# Altium footprint library Footprint-Lib-PhilsLab.PcbLib: 544 footprints (part 27 of 34)
Each footprint in its own frame and in the unit in brackets; x right, y up, seen from the top. Pads: shape width x height; smd on the part's side, far side on the other; paste and mask are expansions set on the pad; w line width, h text height; cw(c..) or ccw(c..) is an arc to the next point about the centre after c.
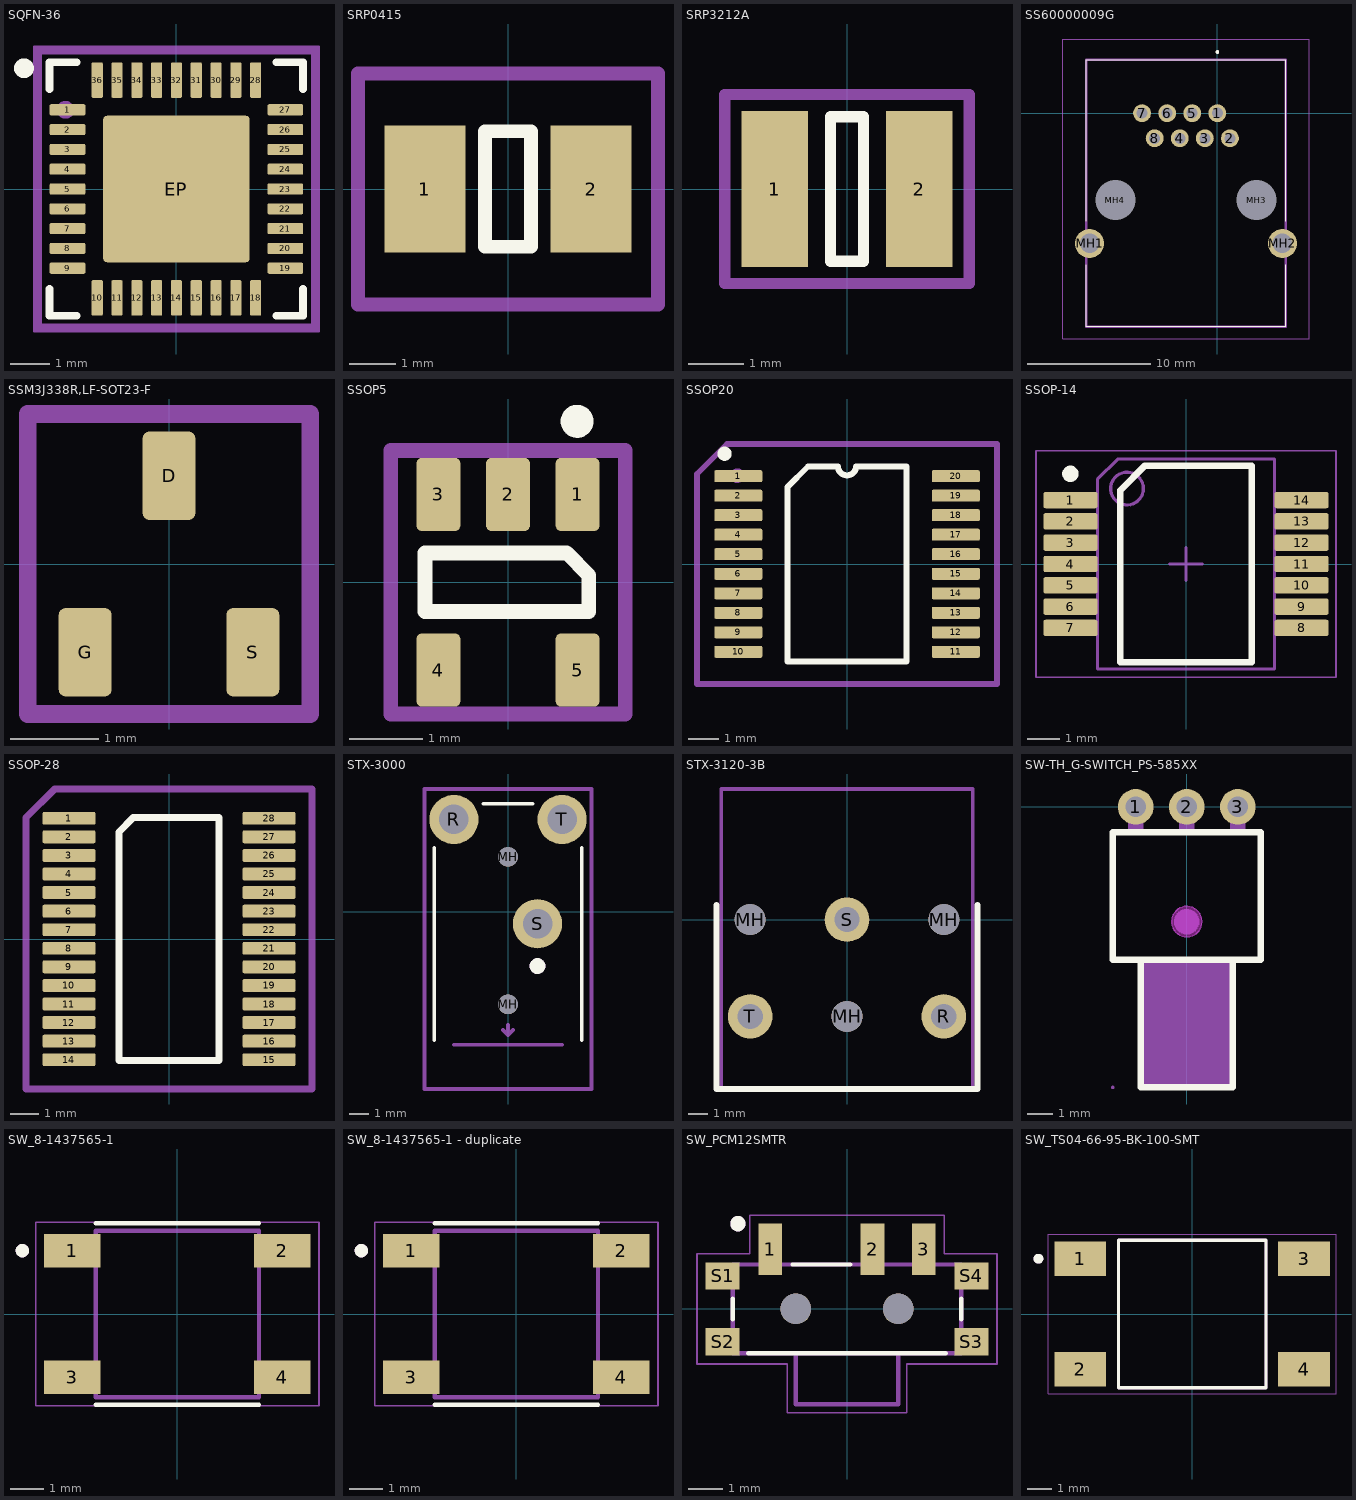
[diagram p26: the footprints below, top view; thin cyan lines are the x and y axes]

## SQFN-36 [mm]
height 1
pads (37):
  rrect25% 0.9x0.28 smd mask+0.05: 1(-2.75,2) 2(-2.75,1.5) 3(-2.75,1) 4(-2.75,0.5) 5(-2.75,0) 6(-2.75,-0.5) 7(-2.75,-1) 8(-2.75,-1.5) 9(-2.75,-2) 19(2.75,-2) 20(2.75,-1.5) 21(2.75,-1) 22(2.75,-0.5) 23(2.75,0) 24(2.75,0.5) 25(2.75,1) 26(2.75,1.5) 27(2.75,2)
  rrect25% 0.28x0.9 smd mask+0.05: 10(-2,-2.75) 11(-1.5,-2.75) 12(-1,-2.75) 13(-0.5,-2.75) 14(0,-2.75) 15(0.5,-2.75) 16(1,-2.75) 17(1.5,-2.75) 18(2,-2.75) 28(2,2.75) 29(1.5,2.75) 30(1,2.75) 31(0.5,2.75) 32(0,2.75) 33(-0.5,2.75) 34(-1,2.75) 35(-1.5,2.75) 36(-2,2.75)
  rrect5% 3.7x3.7 smd: EP(0,0)
Top Overlay:
  circle w0.25: c-3.85,3.05 r0.125
  lines w0.2: -3.2,-2.525 -3.2,-3.2 -2.525,-3.2 ; -3.2,2.525 -3.2,3.2 -2.525,3.2 ; 2.525,-3.2 3.2,-3.2 3.2,-2.525 ; 2.525,3.2 3.2,3.2 3.2,2.525
Mechanical 13:
  circle w0.25: c-2.8,2 r0.1
  lines w0.2: -3.5,-3.5 3.5,-3.5 3.5,3.5 -3.5,3.5 -3.5,-3.5
  text "'.Designator'" at -5.665,-0.417 h1
Mechanical 15:
  lines w0.05: -3.6,-3.6 3.6,-3.6 3.6,3.6 -3.6,3.6 -3.6,-3.6
  lines w0.1: -0.5,0 0.5,0 ; 0,-0.5 0,0.5
3D body "SQFN-36.step": height 1, standoff 0, extent -3.051,-3.051 3.051,3.051

## SRP0415 [mm]
pads (2):
  rect 1.75x2.75 smd: 1(-1.8,0) 2(1.8,0)
Top Overlay:
  lines w0.3: -0.5,-1.25 -0.5,1.25 0.5,1.25 0.5,-1.25 -0.5,-1.25
Mechanical 13:
  lines w0.3: -3.25,-2.5 -3.25,2.5 3.25,2.5 3.25,-2.5 -3.25,-2.5
  text "'.Designator'" at -5.84,-0.925 h1
3D body "SRP0415.stp": height 1.55, standoff 0.05, extent -2.205,-2.05 2.205,2.051

## SRP3212A [mm]
pads (2):
  rect 1.2x2.8 smd: 1(-1.3,0) 2(1.3,0)
Top Overlay:
  lines w0.2: -0.3,-1.3 -0.3,1.3 0.3,1.3 0.3,-1.3 -0.3,-1.3
Mechanical 13:
  lines w0.2: -2.2,-1.7 2.2,-1.7 2.2,1.7 -2.2,1.7 -2.2,-1.7
  text "'.Designator'" at -5.665,-0.417 h1
3D body "SRP3212A.stp": height 1.15, standoff 0.01, extent -1.61,-1.26 1.61,1.26

## SS60000009G [mm]
pads (12):
  round 1.446 hole 0.89: 1(0,0) 2(1.02,-2.03) 3(-1.01,-2.03) 4(-3.04,-2.03) 5(-2.03,0) 6(-4.06,0) 7(-6.09,0) 8(-5.07,-2.03)
  round 2.355 hole 1.57: MH1(-10.335,-10.54) MH2(5.265,-10.54)
  round 1.625 hole 3.25 unplated: MH3(3.18,-7.03) MH4(-8.25,-7.03)
Top Overlay:
  lines w0.1: -10.6,4.32 5.53,4.32 ; -10.6,4.32 5.53,4.32 ; -10.6,4.32 -10.6,-8.75 -10.6,4.32 ; 5.53,-17.25 -10.6,-17.25 5.53,-17.25 ; 5.53,-17.25 5.53,-12.25 5.53,-17.25 ; 5.53,4.32 5.53,-8.75 5.53,4.32 ; -10.6,-17.27 -10.6,-12.25 -10.6,-17.27
  lines w0.2: 0,4.9 cw(c0,4.95) 0,5 ; 0,4.9 ccw(c0,4.95) 0,5 ; 0,4.9 cw(c0,4.95) 0,5
Mechanical 15:
  lines w0.2: -10.6,-17.27 5.53,-17.27 5.53,4.32 -10.6,4.32 -10.6,-17.27
Bottom Assembly:
  lines w0.1: -12.512,-18.27 7.442,-18.27 7.442,6 -12.512,6 -12.512,-18.27
3D body "SS60000-009G.stp": height 13.8, standoff -3.22, extent -10.504,-16.992 5.6,4.192

## SSM3J338R,LF-SOT23-F [mm]
pads (3):
  rrect25% 0.6x1 smd: D(0,1) G(-0.95,-1) S(0.95,-1)
Mechanical 13:
  lines w0.2: -1.6,-1.7 -1.6,1.7 1.6,1.7 1.6,-1.7 -1.6,-1.7
  text "'.Designator'" at -5.84,-0.925 h1
3D body "SOT-23F.STEP": height 0.91, standoff 0, extent -1.45,-1.2 1.45,1.2

## SSOP5 [mm]
pads (5):
  rrect25% 0.6x1 smd: 1(0.95,1.2) 2(0,1.2) 3(-0.95,1.2) 4(-0.95,-1.2) 5(0.95,-1.2)
Top Overlay:
  circle w0.25: c0.944,2.199 r0.1
  lines w0.2: -1.134,-0.4 -1.134,0.4 0.8,0.4 1.104,0.096 1.104,-0.4 -1.134,-0.4
Mechanical 13:
  circle w0.25: c0.962,1.225 r0.1
  lines w0.2: -1.6,-1.8 -1.6,-0.4 -1.6,1.8 1.6,1.8 1.6,-1.8 -1.6,-1.8
  text "'.Designator'" at -5.84,-0.925 h1
3D body "SSOP5.stp": height 1.12, standoff 0, extent -1.45,-1.4 1.45,1.4

## SSOP20 [mm]
pads (20):
  rrect25% 1.6x0.4 smd mask+0.07: 1(-3.625,2.925) 2(-3.625,2.275) 3(-3.625,1.625) 4(-3.625,0.975) 5(-3.625,0.325) 6(-3.625,-0.325) 7(-3.625,-0.975) 8(-3.625,-1.625) 9(-3.625,-2.275) 10(-3.625,-2.925) 11(3.625,-2.925) 12(3.625,-2.275) 13(3.625,-1.625) 14(3.625,-0.975) 15(3.625,-0.325) 16(3.625,0.325) 17(3.625,0.975) 18(3.625,1.625) 19(3.625,2.275) 20(3.625,2.925)
Top Overlay:
  circle w0.25: c-4.079,3.677 r0.112
  lines w0.2: -1.99,-3.25 -1.99,2.56 -1.3,3.25 -0.3,3.25 ccw(c0,3.25) 0.3,3.25 1.99,3.25 1.99,-3.25 -1.99,-3.25
Mechanical 13:
  circle w0.25: c-3.66,2.943 r0.117
  lines w0.2: -5,-4 5,-4 5,4 -4,4 -5,3 -5,-4
  text "'.Designator'" at -5.84,-0.925 h1
3D body "SSOP20.step": height 1.85, standoff 0.01, extent -3.95,-3.63 3.95,3.67

## SSOP-14 [mm]
height 2
pads (14):
  rrect25% 1.65x0.5 smd mask+0.15: 1(-3.525,1.95) 2(-3.525,1.3) 3(-3.525,0.65) 4(-3.525,0) 5(-3.525,-0.65) 6(-3.525,-1.3) 7(-3.525,-1.95) 8(3.525,-1.95) 9(3.525,-1.3) 10(3.525,-0.65) 11(3.525,0) 12(3.525,0.65) 13(3.525,1.3) 14(3.525,1.95)
Top Overlay:
  circle w0.25: c-3.525,2.75 r0.125
  lines w0.2: -2,-3 -2,2.25 -1.25,3 2,3 2,-3 -2,-3
Mechanical 13:
  circle w0.1: c-1.8,2.3 r0.5
  lines w0.1: -2.7,-3.2 -2.7,2.579 -2.079,3.2 2.7,3.2 2.7,-3.2 -2.7,-3.2
  text "'.Designator'" at -6.315,-1.4 h1
Mechanical 15:
  lines w0.05: -4.575,-3.45 4.575,-3.45 4.575,3.45 -4.575,3.45 -4.575,-3.45
  lines w0.1: -0.5,0 0.5,0 ; 0,-0.5 0,0.5
3D body "SSOP-14.step": height 2, standoff 0, extent -3.875,-3.2 3.875,3.2

## SSOP-28 [mm]
pads (28):
  rrect25% 1.85x0.45 smd mask+0.15: 1(-3.5,4.225) 2(-3.5,3.575) 3(-3.5,2.925) 4(-3.5,2.275) 5(-3.5,1.625) 6(-3.5,0.975) 7(-3.5,0.325) 8(-3.5,-0.325) 9(-3.5,-0.975) 10(-3.5,-1.625) 11(-3.5,-2.275) 12(-3.5,-2.925) 13(-3.5,-3.575) 14(-3.5,-4.225) 15(3.5,-4.225) 16(3.5,-3.575) 17(3.5,-2.925) 18(3.5,-2.275) 19(3.5,-1.625) 20(3.5,-0.975) 21(3.5,-0.325) 22(3.5,0.325) 23(3.5,0.975) 24(3.5,1.625) 25(3.5,2.275) 26(3.5,2.925) 27(3.5,3.575) 28(3.5,4.225)
Top Overlay:
  lines w0.25: -1.75,-4.25 1.75,-4.25 1.75,4.25 -1.25,4.25 -1.75,3.75 -1.75,-4.25
Mechanical 13:
  lines w0.25: -5,-5.25 5,-5.25 5,5.25 -4,5.25 -5,4.25 -5,-5.25
  text "'.Designator'" at -5.815,-0.9 h1
3D body "SSOP-28.STEP": height 2.01, standoff 0.01, extent -3.909,-5.108 3.891,5.092

## STX-3000 [mm]
height 5.4
pads (5):
  round 1 hole 1 unplated: MH(0,-4.7) MH(0,2.8)
  round 2.5 hole 1.5: R(-2.75,4.7) S(1.5,-0.6) T(2.75,4.7)
Top Overlay:
  circle w0.5: c1.5,-2.75 r0.15
  lines w0.2: -3.75,-6.5 -3.75,3.25 ; -1.25,5.5 1.25,5.5 ; 3.75,-6.5 3.75,3.25
Mechanical 13:
  circle w0.5: c1.5,-2.75 r0.15
  lines w0.2: -2.75,-6.75 2.75,-6.75 ; -0.25,-6 0,-6.25 ; 0,-5.75 0,-6.25 ; 0.25,-6 0,-6.25 ; -4.25,-9 -4.25,-5 -4.25,6.25 4.25,6.25 4.25,-7.25 4.25,-9 -4.25,-9
  text "'.Designator'" at -5.665,-0.417 h1
3D body "STX-3000.stp": height 5.93, standoff -2.72, extent -3.6,-8.7 3.6,5.266

## STX-3120-3B [mm]
pads (6):
  round 1.6 hole 1.6 unplated: MH(-5,0) MH(0,-5) MH(5,0)
  round 2.3 hole 1.3: R(5,-5) S(0,0) T(-5,-5)
Top Overlay:
  lines w0.3: -6.75,0.75 -6.75,-8.75 6.75,-8.75 6.75,0.75
Mechanical 13:
  lines w0.2: -6.5,-8.75 6.5,-8.75 6.5,6.75 -6.5,6.75 -6.5,-8.75
  text ".Designator" at -4.998,-0.333 h1
3D body "STX-3120-3B.STEP": height 10.22, standoff -3.68, extent -6,-8.6 6,6.5

## SW-TH_G-SWITCH_PS-585XX [mm]
pads (3):
  round 1.4 hole 0.8 paste-2539.97 mask+0.05: 1(-2,0) 2(0,0) 3(2,0)
Top Overlay:
  lines w0.254: -1.8,-6 -1.8,-11 1.8,-11 1.8,-6 ; -2.9,-6 2.9,-6 2.9,-1 -2.9,-1 -2.9,-6
Keep-Out Layer:
  board cut-out: 0.6,-4.5 0.6,-4.534 0.592,-4.601 0.577,-4.666 0.555,-4.73 0.526,-4.791 0.49,-4.848 0.448,-4.901 0.4,-4.948 0.348,-4.99 0.291,-5.026 0.23,-5.055 0.166,-5.078 0.101,-5.093 0.034,-5.1 -0.034,-5.1 -0.101,-5.093 -0.166,-5.078 -0.23,-5.055 -0.291,-5.026 -0.348,-4.99 -0.4,-4.948 -0.448,-4.901 -0.49,-4.848 -0.526,-4.791 -0.555,-4.73 -0.577,-4.666 -0.592,-4.601 -0.6,-4.534 -0.6,-4.5 -0.6,-4.466 -0.592,-4.399 -0.577,-4.334 -0.555,-4.27 -0.526,-4.209 -0.49,-4.152 -0.448,-4.1 -0.4,-4.052 -0.348,-4.01 -0.291,-3.974 -0.23,-3.945 -0.166,-3.923 -0.101,-3.908 -0.034,-3.9 0.034,-3.9 0.101,-3.908 0.166,-3.923 0.23,-3.945 0.291,-3.974 0.348,-4.01 0.4,-4.052 0.448,-4.1 0.49,-4.152 0.526,-4.209 0.555,-4.27 0.577,-4.334 0.592,-4.399 0.6,-4.466 0.6,-4.5
Keep-Out Layer:
  circle w0.003: c0,-4.5 r0.6
  region: 0.6,-4.5 0.6,-4.534 0.592,-4.601 0.577,-4.666 0.555,-4.73 0.526,-4.791 0.49,-4.848 0.448,-4.901 0.4,-4.948 0.348,-4.99 0.291,-5.026 0.23,-5.055 0.166,-5.078 0.101,-5.093 0.034,-5.1 -0.034,-5.1 -0.101,-5.093 -0.166,-5.078 -0.23,-5.055 -0.291,-5.026 -0.348,-4.99 -0.4,-4.948 -0.448,-4.901 -0.49,-4.848 -0.526,-4.791 -0.555,-4.73 -0.577,-4.666 -0.592,-4.601 -0.6,-4.534 -0.6,-4.5 -0.6,-4.466 -0.592,-4.399 -0.577,-4.334 -0.555,-4.27 -0.526,-4.209 -0.49,-4.152 -0.448,-4.1 -0.4,-4.052 -0.348,-4.01 -0.291,-3.974 -0.23,-3.945 -0.166,-3.923 -0.101,-3.908 -0.034,-3.9 0.034,-3.9 0.101,-3.908 0.166,-3.923 0.23,-3.945 0.291,-3.974 0.348,-4.01 0.4,-4.052 0.448,-4.1 0.49,-4.152 0.526,-4.209 0.555,-4.27 0.577,-4.334 0.592,-4.399 0.6,-4.466 0.6,-4.5
  region: 0.6,-4.5 0.591,-4.604 0.564,-4.705 0.52,-4.8 0.46,-4.886 0.386,-4.96 0.3,-5.02 0.205,-5.064 0.104,-5.091 0,-5.1 -0.104,-5.091 -0.205,-5.064 -0.3,-5.02 -0.386,-4.96 -0.46,-4.886 -0.52,-4.8 -0.564,-4.705 -0.591,-4.604 -0.6,-4.5 -0.591,-4.396 -0.564,-4.295 -0.52,-4.2 -0.46,-4.114 -0.386,-4.04 -0.3,-3.981 -0.205,-3.936 -0.104,-3.909 0,-3.9 0.104,-3.909 0.205,-3.936 0.3,-3.981 0.386,-4.04 0.46,-4.114 0.52,-4.2 0.564,-4.295 0.591,-4.396
Mechanical 1:
  circle w0.003: c0,-4.5 r0.6
Top Component Center:
  circle w0.5: c0,-4.5 r0.25
  region: -1.8,-6 -1.8,-11 1.8,-11 1.8,-6
Top Courtyard:
  lines w0.051: -2.9,-6 -2.9,-1 2.9,-1 2.9,-6 1.8,-6 1.8,-11 -1.8,-11 -1.8,-6 -2.9,-6
Mechanical 7:
  region: 2.3,0.15 1.7,0.15 1.7,-1.05 2.3,-1.05
  region: 0.3,0.15 -0.3,0.15 -0.3,-1.05 0.3,-1.05
  region: -1.7,0.15 -2.3,0.15 -2.3,-1.05 -1.7,-1.05
Mechanical 8:
  region: -2.84,-11 -2.84,-11.005 -2.841,-11.014 -2.844,-11.023 -2.849,-11.031 -2.854,-11.039 -2.861,-11.046 -2.868,-11.051 -2.877,-11.056 -2.886,-11.058 -2.895,-11.06 -2.905,-11.06 -2.914,-11.058 -2.923,-11.056 -2.931,-11.051 -2.939,-11.046 -2.946,-11.039 -2.951,-11.031 -2.955,-11.023 -2.958,-11.014 -2.96,-11.005 -2.96,-11 -2.96,-10.995 -2.958,-10.986 -2.955,-10.977 -2.951,-10.969 -2.946,-10.961 -2.939,-10.954 -2.931,-10.949 -2.923,-10.944 -2.914,-10.941 -2.905,-10.94 -2.895,-10.94 -2.886,-10.941 -2.877,-10.944 -2.868,-10.949 -2.861,-10.954 -2.854,-10.961 -2.849,-10.969 -2.844,-10.977 -2.841,-10.986 -2.84,-10.995 -2.84,-11
Mechanical 9:
  region: 1.7,0.15 2.3,0.15 2.3,-0.15 1.7,-0.15
  region: -0.3,0.15 0.3,0.15 0.3,-0.15 -0.3,-0.15
  region: -2.3,0.15 -1.7,0.15 -1.7,-0.15 -2.3,-0.15

## SW_8-1437565-1 [mm]
pads (4):
  rect 1.7x1 smd: 1(-3.15,1.9) 2(3.15,1.9) 3(-3.15,-1.9) 4(3.15,-1.9)
Top Overlay:
  circle w0.2: c-4.65,1.9 r0.1
  lines w0.127: -2.45,-2.72 2.45,-2.72 ; -2.45,2.72 2.45,2.72
Mechanical 13:
  circle w0.2: c-4.65,1.9 r0.1
  lines w0.127: -2.45,-2.5 -2.45,2.5 2.45,2.5 2.45,-2.5 -2.45,-2.5
Mechanical 15:
  lines w0.05: -4.25,-2.75 -4.25,2.75 4.25,2.75 4.25,-2.75 -4.25,-2.75
3D body "8-1437565-1.stp": height 1.5, standoff 0, extent -3.26,-2.44 3.34,2.56

## SW_8-1437565-1 - duplicate [mm]
pads (4):
  rect 1.7x1 smd: 1(-3.15,1.9) 2(3.15,1.9) 3(-3.15,-1.9) 4(3.15,-1.9)
Top Overlay:
  circle w0.2: c-4.65,1.9 r0.1
  lines w0.127: -2.45,-2.72 2.45,-2.72 ; -2.45,2.72 2.45,2.72
Mechanical 13:
  circle w0.2: c-4.65,1.9 r0.1
  lines w0.127: -2.45,-2.5 -2.45,2.5 2.45,2.5 2.45,-2.5 -2.45,-2.5
Mechanical 15:
  lines w0.05: -4.25,-2.75 -4.25,2.75 4.25,2.75 4.25,-2.75 -4.25,-2.75
3D body "8-1437565-1.stp": height 1.65, standoff 0.15, extent -3.3,-2.373 3.3,2.627

## SW_PCM12SMTR [mm]
pads (9):
  rect 0.7x1.5 smd: 1(-2.25,1.75) 2(0.75,1.75) 3(2.25,1.75)
  rect 1x0.8 smd: S1(-3.65,0.965) S2(-3.65,-0.965) S3(3.65,-0.965) S4(3.65,0.965)
  round 0.9 hole 0.9 unplated: ""(-1.5,0) ""(1.5,0)
Top Overlay:
  circle w0.25: c-3.2,2.5 r0.1
  lines w0.127: -3.35,-0.3 -3.35,0.3 ; -2.9,-1.3 2.9,-1.3 ; -1.6,1.3 0.1,1.3 ; 3.35,-0.3 3.35,0.3
Mechanical 13:
  circle w0.25: c-3.2,2.5 r0.1
  lines w0.127: -1.5,-1.3 1.5,-1.3 ; -1.5,-1.3 -3.35,-1.3 -3.35,1.3 3.35,1.3 3.35,-1.3 1.5,-1.3 ; -1.5,-1.3 -1.5,-2.8 1.5,-2.8 1.5,-1.3
Mechanical 15:
  lines w0.05: -4.4,-1.615 -1.75,-1.615 -1.75,-3.05 1.75,-3.05 1.75,-1.615 4.4,-1.615 4.4,1.615 2.85,1.615 2.85,2.75 -2.85,2.75 -2.85,1.615 -4.4,1.615 -4.4,-1.615
3D body "step_temp.STEP": height 1.4, standoff -0.51, extent -3.861,-2.794 3.861,2.184

## SW_TS04-66-95-BK-100-SMT [mm]
pads (4):
  rect 2.1x1.4 smd: 1(-4.55,2.25) 2(-4.55,-2.25) 3(4.55,2.25) 4(4.55,-2.25)
Top Overlay:
  circle w0.2: c-6.25,2.25 r0.1
  lines w0.127: -3,-3 -3,3 3,3 3,-3 -3,-3
Mechanical 13:
  circle w0.2: c-6.25,2.25 r0.1
  lines w0.127: -3,-3 -3,3 3,3 3,-3 -3,-3
Mechanical 15:
  lines w0.05: -5.85,-3.25 -5.85,3.25 5.85,3.25 5.85,-3.25 -5.85,-3.25
3D body "step_temp.STEP": height 9.5, standoff 0, extent -5,-3 5,3